# Altium footprint library discretes.PcbLib: 1 footprints
Each footprint in its own frame and in the unit in brackets; x right, y up, seen from the top. Pads: shape width x height; smd on the part's side, far side on the other; paste and mask are expansions set on the pad; w line width, h text height; cw(c..) or ccw(c..) is an arc to the next point about the centre after c.
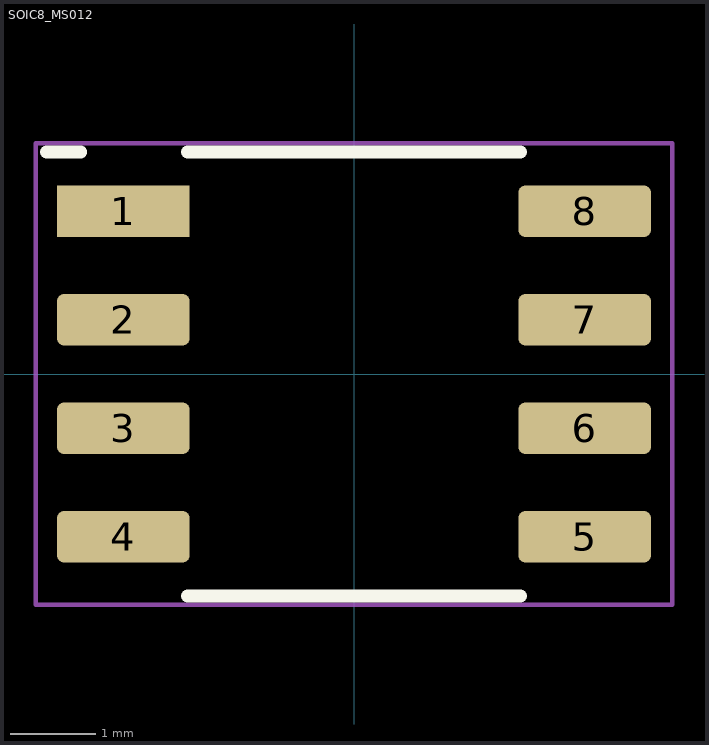
[diagram p0: the footprint, top view; thin cyan lines are the x and y axes]

## SOIC8_MS012 [mm] "SO-8 (JEDEC MS-012) for AO4407C; signal-pad land from TI DDA0008 (also MS-012)"
height 1.75
pads (8):
  rect 1.55x0.6 smd: 1(-2.7,1.905)
  rrect25% 1.55x0.6 smd: 2(-2.7,0.635) 3(-2.7,-0.635) 4(-2.7,-1.905) 5(2.7,-1.905) 6(2.7,-0.635) 7(2.7,0.635) 8(2.7,1.905)
Top Overlay:
  lines w0.15: -3.6,2.6 -3.2,2.6 ; -1.95,-2.6 1.95,-2.6 ; -1.95,2.6 1.95,2.6
  text ".Designator" at 0,2.805 h1
Top Courtyard:
  lines w0.05: -3.725,-2.7 3.725,-2.7 3.725,2.7 -3.725,2.7 -3.725,-2.7
3D body: height 1.75, standoff 0, extent -1.95,-2.45 1.95,2.45